# Altium footprint library FootPrintLib_8.PcbLib: 590 footprints (part 23 of 37)
Each footprint in its own frame and in the unit in brackets; x right, y up, seen from the top. Pads: shape width x height; smd on the part's side, far side on the other; paste and mask are expansions set on the pad; w line width, h text height; cw(c..) or ccw(c..) is an arc to the next point about the centre after c.
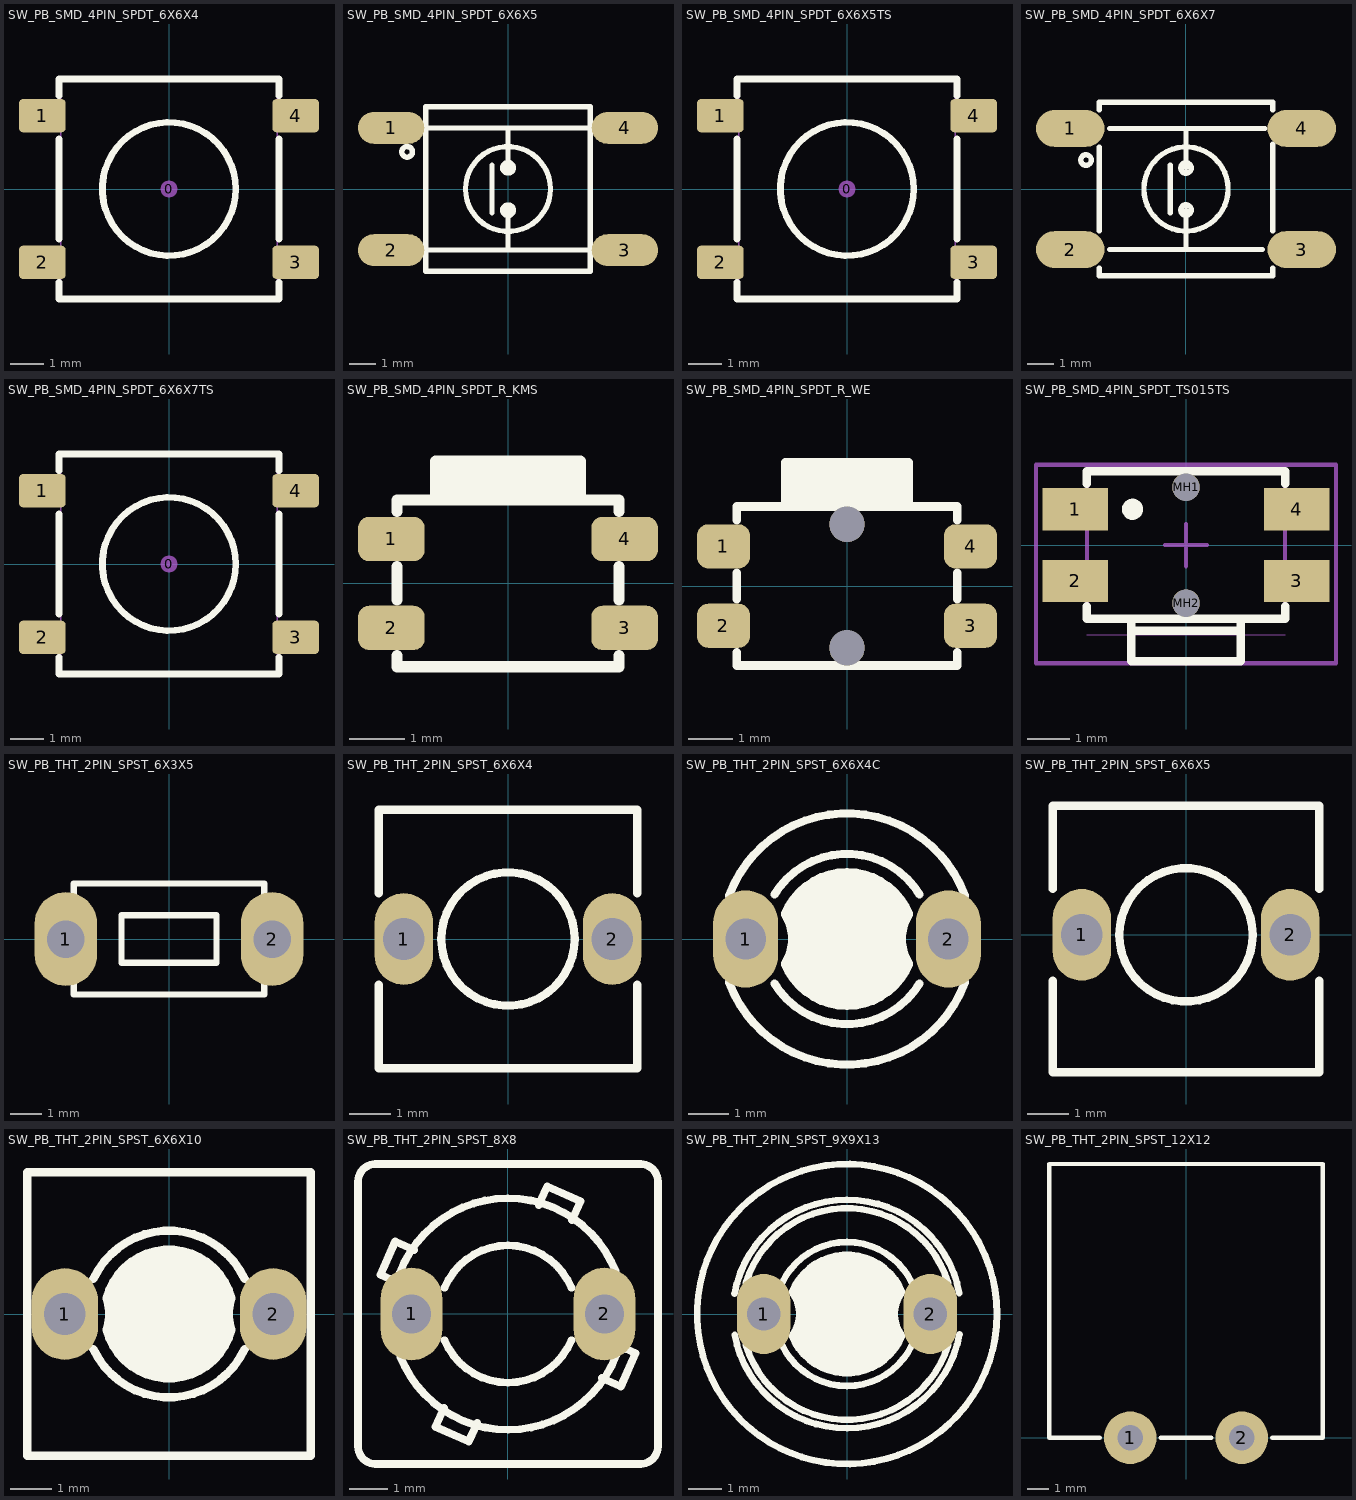
[diagram p22: the footprints below, top view; thin cyan lines are the x and y axes]

## SW_PB_SMD_4PIN_SPDT_6X6X4 [mm] "SWITCH, PUSHBUTTON, SMD, SPDT, 6.5x6.5mm, 4.3mm, TS-1143S"
height 4.3
pads (5):
  round 0.508 on Mech15 mask+0.1: 0(0,0)
  rrect25% 1.4x1 smd mask+0.1: 1(-3.8,2.2) 2(-3.8,-2.2) 3(3.8,-2.2) 4(3.8,2.2)
Top Overlay:
  circle w0.2: c0,0 r2
  lines w0.2: -3.3,-2.8 -3.3,-3.3 3.3,-3.3 3.3,-2.8 ; -3.3,-1.5 -3.3,1.5 ; -3.3,2.8 -3.3,3.3 3.3,3.3 3.3,2.8 ; 3.3,-1.5 3.3,1.5
Mechanical 13:
  lines w0.05: -3.25,-3.25 3.25,-3.25 3.25,3.25 -3.25,3.25 -3.25,-3.25
3D body "TS-1143S-WP.STEP": height 4.3, standoff 0, extent -4,-3.25 4,3.25

## SW_PB_SMD_4PIN_SPDT_6X6X5 [mm] "SWITCH, PUSHBUTTON, SMD, SPDT, 6X6mm 4PIN"
height 5
pads (4):
  oval 2.5x1.2 smd mask+0.1: 1(-4.4,2.3) 2(-4.4,-2.3) 3(4.4,-2.3) 4(4.4,2.3)
Top Overlay:
  circle w0.2: c-3.8,1.4 r0.2
  circle w0.2: c0,0 r1.6
  circle w0.2: c0,0.8 r0.2
  circle w0.2: c0,-0.8 r0.2
  lines w0.2: -3.1,-2.3 3,-2.3 ; -3.1,2.3 3,2.3 ; -0.6,-0.9 -0.6,0.9 ; 0,-2.3 0,-0.8 ; 0,0.8 0,2.3 ; -3.1,-3.1 3.1,-3.1 3.1,3.1 -3.1,3.1 -3.1,-3.1
3D body "User Library-FSM4JSMATR - TE Connectivity - SPST 6mm Tactile Switch.step": height 5.07, standoff 0.1, extent -5,-3 5,3

## SW_PB_SMD_4PIN_SPDT_6X6X5TS [mm] "SWITCH, PUSHBUTTON, SMD, SPDT, 6.5x6.5mm, 5.0mm, TS-1150S"
height 5
pads (5):
  round 0.508 on Mech15 mask+0.1: 0(0,0)
  rrect25% 1.4x1 smd mask+0.1: 1(-3.8,2.2) 2(-3.8,-2.2) 3(3.8,-2.2) 4(3.8,2.2)
Top Overlay:
  circle w0.2: c0,0 r2
  lines w0.2: -3.3,-2.8 -3.3,-3.3 3.3,-3.3 3.3,-2.8 ; -3.3,-1.5 -3.3,1.5 ; -3.3,2.8 -3.3,3.3 3.3,3.3 3.3,2.8 ; 3.3,-1.5 3.3,1.5
Mechanical 13:
  lines w0.05: -3.25,-3.25 -3.25,3.25 3.25,3.25 3.25,-3.25 -3.25,-3.25
3D body "TS-1150S-WP.STEP": height 5, standoff 0, extent -4,-3.25 4,3.25

## SW_PB_SMD_4PIN_SPDT_6X6X7 [mm] "SWITCH, PUSHBUTTON, SMD, SPDT, 6.2x6.2x7.3mm, TACTDQ62"
height 7
pads (4):
  oval 2.6x1.4 smd mask+0.1: 1(-4.4,2.3) 2(-4.4,-2.3) 3(4.4,-2.3) 4(4.4,2.3)
Top Overlay:
  circle w0.2: c0,-0.8 r0.2
  circle w0.2: c0,0.8 r0.2
  circle w0.2: c0,0 r1.6
  circle w0.2: c-3.8,1.1 r0.2
  lines w0.2: -3.3,-3 -3.3,-3.3 3.3,-3.3 3.3,-3 ; -3.3,-1.6 -3.3,1.6 ; -3.3,3 -3.3,3.3 3.3,3.3 3.3,3 ; -2.9,-2.3 2.9,-2.3 ; -2.9,2.3 3,2.3 ; -0.6,-0.9 -0.6,0.9 ; 0,-2.3 0,-0.8 ; 0,0.8 0,2.3 ; 3.3,-1.6 3.3,1.7
3D body "User Library-KT11P2SM.STEP": height 5.48, standoff -0.05, extent -5.034,-3.172 5,3.172

## SW_PB_SMD_4PIN_SPDT_6X6X7TS [mm] "SWITCH, PUSHBUTTON, SMD, SPDT, 7.0mm, TS-1170S"
height 7
pads (5):
  round 0.508 on Mech15 mask+0.1: 0(0,0)
  rrect25% 1.4x1 smd mask+0.1: 1(-3.8,2.2) 2(-3.8,-2.2) 3(3.8,-2.2) 4(3.8,2.2)
Top Overlay:
  circle w0.2: c0,0 r2
  lines w0.2: -3.3,-2.8 -3.3,-3.3 3.3,-3.3 3.3,-2.8 ; -3.3,-1.5 -3.3,1.5 ; -3.3,2.8 -3.3,3.3 3.3,3.3 3.3,2.8 ; 3.3,-1.5 3.3,1.5
Mechanical 13:
  lines w0.05: -3.25,-3.25 3.25,-3.25 3.25,3.25 -3.25,3.25 -3.25,-3.25
3D body "TS-1170S-WP.stp": height 7, standoff 0, extent -4,-3.25 4,3.25

## SW_PB_SMD_4PIN_SPDT_R_KMS [mm] "SWITCH, PUSHBUTTON, SMD, SPDT, RIGHT"
pads (4):
  rrect50% 1.2x0.8 smd mask+0.1: 1(-2.1,0.8) 2(-2.1,-0.8) 3(2.1,-0.8) 4(2.1,0.8)
Top Overlay:
  rectangle: -1.3,1.5 1.3,2.2
  lines w0.2: -2,-1.3 -2,-1.5 2,-1.5 2,-1.3 ; -2,-0.3 -2,0.3 ; -2,1.3 -2,1.5 2,1.5 2,1.3 ; -1.3,1.5 -1.3,2.2 1.3,2.2 1.3,1.5 ; 2,-0.3 2,0.3
3D body "KMS221GLFS.stp": height 1.42, standoff -0.02, extent -2.3,-1.4 2.3,2.15

## SW_PB_SMD_4PIN_SPDT_R_WE [mm] "SWITCH, PUSHBUTTON, SMD, SPDT, RIGHT"
pads (6):
  rrect50% 1.2x1 smd mask+0.1: 1(-2.8,0.9) 2(-2.8,-0.9) 3(2.8,-0.9) 4(2.8,0.9)
  round 0.8 hole 0.8 unplated: ""(0,-1.4) ""(0,1.4)
Top Overlay:
  rectangle: -1.4,1.8 1.4,2.8
  lines w0.2: -2.5,-1.5 -2.5,-1.8 2.5,-1.8 2.5,-1.5 ; -2.5,-0.3 -2.5,0.3 ; -2.5,1.5 -2.5,1.8 2.5,1.8 2.5,1.5 ; -1.4,1.8 -1.4,2.8 1.4,2.8 1.4,1.8 ; 2.5,-0.3 2.5,0.3
3D body "436331045822 (rev1).stp": height 1.65, standoff -0.5, extent -3.2,-1.75 3.2,2.75

## SW_PB_SMD_4PIN_SPDT_TS015TS [mm] "SMT Switch TS-015"
height 1.4
pads (6):
  rect 1.55x1 smd: 1(-2.625,0.85) 2(-2.625,-0.85) 3(2.625,-0.85) 4(2.625,0.85)
  round 0.65 hole 0.65 unplated: MH1(0,1.375) MH2(0,-1.375)
Top Overlay:
  circle w0.25: c-1.27,0.85 r0.125
  lines w0.2: -2.35,-1.45 -2.35,-1.75 2.35,-1.75 2.35,-1.45 ; -2.35,1.45 -2.35,1.75 2.35,1.75 2.35,1.45 ; -1.3,-2.025 1.3,-2.025 ; -1.3,-1.75 -1.3,-2.75 1.3,-2.75 1.3,-1.75
Mechanical 13:
  lines w0.025: -2.35,-2.125 2.35,-2.125
  lines w0.1: -1.3,-1.75 -1.3,-2.75 1.3,-2.75 1.3,-1.75 ; -2.35,-1.75 -2.35,1.75 2.35,1.75 2.35,-1.75 -2.35,-1.75
  text "PCB Edge" at -2.4,-2.05 h0.13
Mechanical 15:
  lines w0.1: -0.5,0 0.5,0 ; 0,-0.5 0,0.5 ; -3.556,-2.8 -3.556,1.905 3.556,1.905 3.556,-2.8 -3.556,-2.8
3D body "SMT Tactile Switch TS-015.STEP": height 1.65, standoff -0.55, extent -3.1,-2.75 3.1,1.8

## SW_PB_THT_2PIN_SPST_6X3X5 [mm] "SWITCH, PUSHBUTTON, THD, SPST, 6X3.5mm"
pads (2):
  oval 2x3 hole 1.2 mask+0.1: 1(-3.3,0) 2(3.3,0)
Top Overlay:
  lines w0.2: -3.048,-1.778 3.048,-1.778 3.048,1.778 -3.048,1.778 -3.048,-1.778 ; -1.524,-0.762 1.524,-0.762 1.524,0.762 -1.524,0.762 -1.524,-0.762
3D body "43408.stp": height 4.3, standoff -3.5, extent -3.909,-1.75 3.91,1.75

## SW_PB_THT_2PIN_SPST_6X6X4 [mm] "SWITCH, PUSHBUTTON, THD, SPST, 6X6mm"
height 4
pads (2):
  oval 1.4x2.2 hole 1 mask+0.1: 1(-2.5,0) 2(2.5,0)
Top Overlay:
  circle w0.2: c0,0 r1.6
  lines w0.2: -3.1,-1.1 -3.1,-3.1 3.1,-3.1 3.1,-1.1 ; -3.1,1.1 -3.1,3.1 3.1,3.1 3.1,1.1
3D body "Tactile Switch (6mm x 6mm_2pin.STEP": height 4.3, standoff -14, extent -3,-3 3,3.2

## SW_PB_THT_2PIN_SPST_6X6X4C [mm] "SWITCH, PUSHBUTTON, THD, SPST, 6X6X4.3mm"
height 4.3
pads (2):
  oval 1.6x2.4 hole 1 mask+0.1: 1(-2.5,0) 2(2.5,0)
Top Overlay:
  region: -1.533,-0.613 -1.456,-0.471 -1.366,-0.161 -1.366,0.161 -1.456,0.471 -1.533,0.613 -1.472,0.766 -1.292,1.041 -1.062,1.275 -0.79,1.459 -0.486,1.586 -0.164,1.651 0.164,1.651 0.486,1.586 0.79,1.459 1.062,1.275 1.292,1.041 1.472,0.766 1.533,0.613 1.456,0.471 1.366,0.161 1.366,-0.161 1.456,-0.471 1.533,-0.613 1.472,-0.766 1.292,-1.041 1.062,-1.275 0.79,-1.459 0.486,-1.586 0.164,-1.651 -0.164,-1.651 -0.486,-1.586 -0.79,-1.459 -1.062,-1.275 -1.292,-1.041 -1.472,-0.766
  lines w0.2: -2.912,-1.059 ccw(c0,0) 2.912,-1.059 ; -2.912,1.059 cw(c0,0) 2.912,1.059 ; -1.789,-1.1 ccw(c0,0) 1.789,-1.1 ; -1.789,1.1 cw(c0,0) 1.789,1.1 ; -1.533,-0.613 ccw(c0,0) 1.533,-0.613 cw(c2.5,0) 1.533,0.613 ccw(c0,0) -1.533,0.613 cw(c-2.5,0) -1.533,-0.613
3D body "SKRGAA.STEP": height 4.33, standoff -3.47, extent -3.159,-3.099 3.16,3.099

## SW_PB_THT_2PIN_SPST_6X6X5 [mm] "SWITCH, PUSHBUTTON, THD, SPST, 6X6X5mm"
pads (2):
  oval 1.4x2.2 hole 1 mask+0.1: 1(-2.5,0) 2(2.5,0)
Top Overlay:
  circle w0.2: c0,0 r1.6
  lines w0.2: -3.2,-1.1 -3.2,-3.3 3.2,-3.3 3.2,-1.1 ; -3.2,1.1 -3.2,3.1 3.2,3.1 3.2,1.1
3D body "82574 tact switch.stp": height 5, standoff -5.08, extent -3.117,-3.2 3.117,3.029

## SW_PB_THT_2PIN_SPST_6X6X10 [mm] "SWITCH, PUSHBUTTON, THD, SPST, 6X6X9.5 mm"
height 9.5
pads (2):
  oval 1.6x2.2 hole 1 mask+0.1: 1(-2.5,0) 2(2.5,0)
Top Overlay:
  region: -1.499,-0.375 -1.469,-0.284 -1.435,-0.096 -1.435,0.096 -1.469,0.284 -1.499,0.375 -1.457,0.541 -1.303,0.847 -1.086,1.112 -0.816,1.323 -0.506,1.47 -0.171,1.545 0.171,1.545 0.506,1.47 0.816,1.323 1.086,1.112 1.303,0.847 1.457,0.541 1.499,0.375 1.469,0.284 1.435,0.096 1.435,-0.096 1.469,-0.284 1.499,-0.375 1.457,-0.541 1.303,-0.847 1.086,-1.112 0.816,-1.323 0.506,-1.47 0.171,-1.545 -0.171,-1.545 -0.506,-1.47 -0.816,-1.323 -1.086,-1.112 -1.303,-0.847 -1.457,-0.541
  lines w0.2: -1.816,-0.838 ccw(c0,0) 1.816,-0.838 ; -1.816,0.838 cw(c0,0) 1.816,0.838 ; -3.4,-3.4 -3.4,3.4 3.4,3.4 3.4,-3.4 -3.4,-3.4 ; -1.499,-0.375 ccw(c0,0) 1.499,-0.375 cw(c2.5,0) 1.499,0.375 ccw(c0,0) -1.499,0.375 cw(c-2.5,0) -1.499,-0.375
3D body "SKQKAJ.STEP": height 9.53, standoff -3.47, extent -3.3,-3.3 3.3,3.3

## SW_PB_THT_2PIN_SPST_8X8 [mm] "SWITCH, PUSHBUTTON, THD, SPST, 8X8X5.5mm"
height 5.5
pads (2):
  oval 1.6x2.4 hole 1 mask+0.1: 1(-2.5,0) 2(2.5,0)
Top Overlay:
  lines w0.2: -3.886,-3.429 ccw(c-3.429,-3.429) -3.429,-3.886 ; -3.886,3.429 cw(c-3.429,3.429) -3.429,3.886 ; -3.059,0.906 -3.302,1.016 -2.921,1.88 -2.435,1.659 ; -2.801,1.075 cw(c0,0) 2.795,1.091 ; -2.795,-1.091 ccw(c0,0) 2.801,-1.075 ; -1.659,-2.435 -1.88,-2.921 -1.016,-3.302 -0.795,-2.816 ; -1.643,-0.68 ccw(c0,0) 1.643,-0.68 ; -1.643,0.68 cw(c0,0) 1.643,0.68 ; 0.795,2.816 1.016,3.302 1.88,2.921 1.659,2.435 ; 2.435,-1.659 2.921,-1.88 3.302,-1.016 3.059,-0.906 ; 3.429,-3.886 ccw(c3.429,-3.429) 3.886,-3.429 ; 3.886,3.428 cw(c3.886,3.428) 3.886,3.429 ccw(c3.429,3.429) 3.429,3.886 ; 3.429,3.886 ccw(c3.429,3.886) 3.429,3.886
  lines w0.203: -3.886,-3.429 -3.886,3.429 ; -3.429,-3.886 3.429,-3.886 ; -3.429,3.886 3.429,3.886 ; 3.886,-3.429 3.886,3.428
3D body "SKPDAC.STEP": height 5.53, standoff -3.47, extent -3.9,-4.1 3.9,3.9

## SW_PB_THT_2PIN_SPST_9X9X13 [mm] "SWITCH, PUSHBUTTON, THD, SPST, 9X9X13 mm"
height 13
pads (2):
  oval 1.6x2.4 hole 1 mask+0.1: 1(-2.5,0) 2(2.5,0)
Top Overlay:
  circle w0.2: c0,0 r4.5
  region: -1.656,-0.653 -1.605,-0.581 -1.522,-0.427 -1.466,-0.261 -1.437,-0.088 -1.437,0.087 -1.465,0.26 -1.522,0.426 -1.605,0.58 -1.655,0.652 -1.654,0.653 -1.589,0.818 -1.396,1.116 -1.147,1.37 -0.854,1.57 -0.527,1.707 -0.179,1.778 0.176,1.778 0.524,1.708 0.852,1.571 1.145,1.371 1.394,1.118 1.587,0.82 1.653,0.655 1.656,0.653 1.605,0.581 1.522,0.427 1.466,0.261 1.437,0.088 1.437,-0.087 1.465,-0.26 1.522,-0.426 1.605,-0.58 1.655,-0.652 1.654,-0.653 1.589,-0.818 1.396,-1.116 1.147,-1.37 0.854,-1.57 0.527,-1.707 0.179,-1.778 -0.176,-1.778 -0.524,-1.708 -0.852,-1.571 -1.145,-1.371 -1.394,-1.118 -1.587,-0.82 -1.653,-0.655
  lines w0.2: -3.373,0.617 cw(c0,0) 3.371,0.628 ; -3.371,-0.628 ccw(c0,0) 3.373,-0.617 ; -3.038,0.924 cw(c0,0) 3.037,0.926 ; -3.037,-0.926 ccw(c0,0) 3.038,-0.924 ; -1.954,-0.919 ccw(c0,0) 1.953,-0.92 ; -1.953,0.92 cw(c0,0) 1.954,0.919 ; -1.656,-0.653 ccw(c-2.5,0) -1.655,0.652 ; -1.654,0.653 cw(c0,0) 1.653,0.655 ; -1.653,-0.655 ccw(c0,0) 1.654,-0.653 ; 1.655,-0.652 cw(c2.5,0) 1.656,0.653
3D body "SKRCAC.STEP": height 13.03, standoff -3.47, extent -4.517,-4.5 4.517,4.5

## SW_PB_THT_2PIN_SPST_12X12 [mm] "SWITCH, PUSHBUTTON, THD, SPST, 12x12x9.1mm"
height 9
pads (2):
  round 2.5 hole 1.2 mask+0.1: 1(-2.65,0) 2(2.65,0)
Top Overlay:
  lines w0.2: -4.1,0 -6.5,0 -6.5,13 6.5,13 6.5,0 4.1,0 ; -1.2,0 1.2,0
3D body: height 6.5, standoff 0, extent -6,0 6,12
3D body: height 9.1, standoff 0, extent -2.7,3.3 2.7,8.7